# Altium schematic symbol library Connector.SchLib: 231 symbols (part 1 of 2)
Pins are listed as number, name and electrical type; pins without a type are passive.

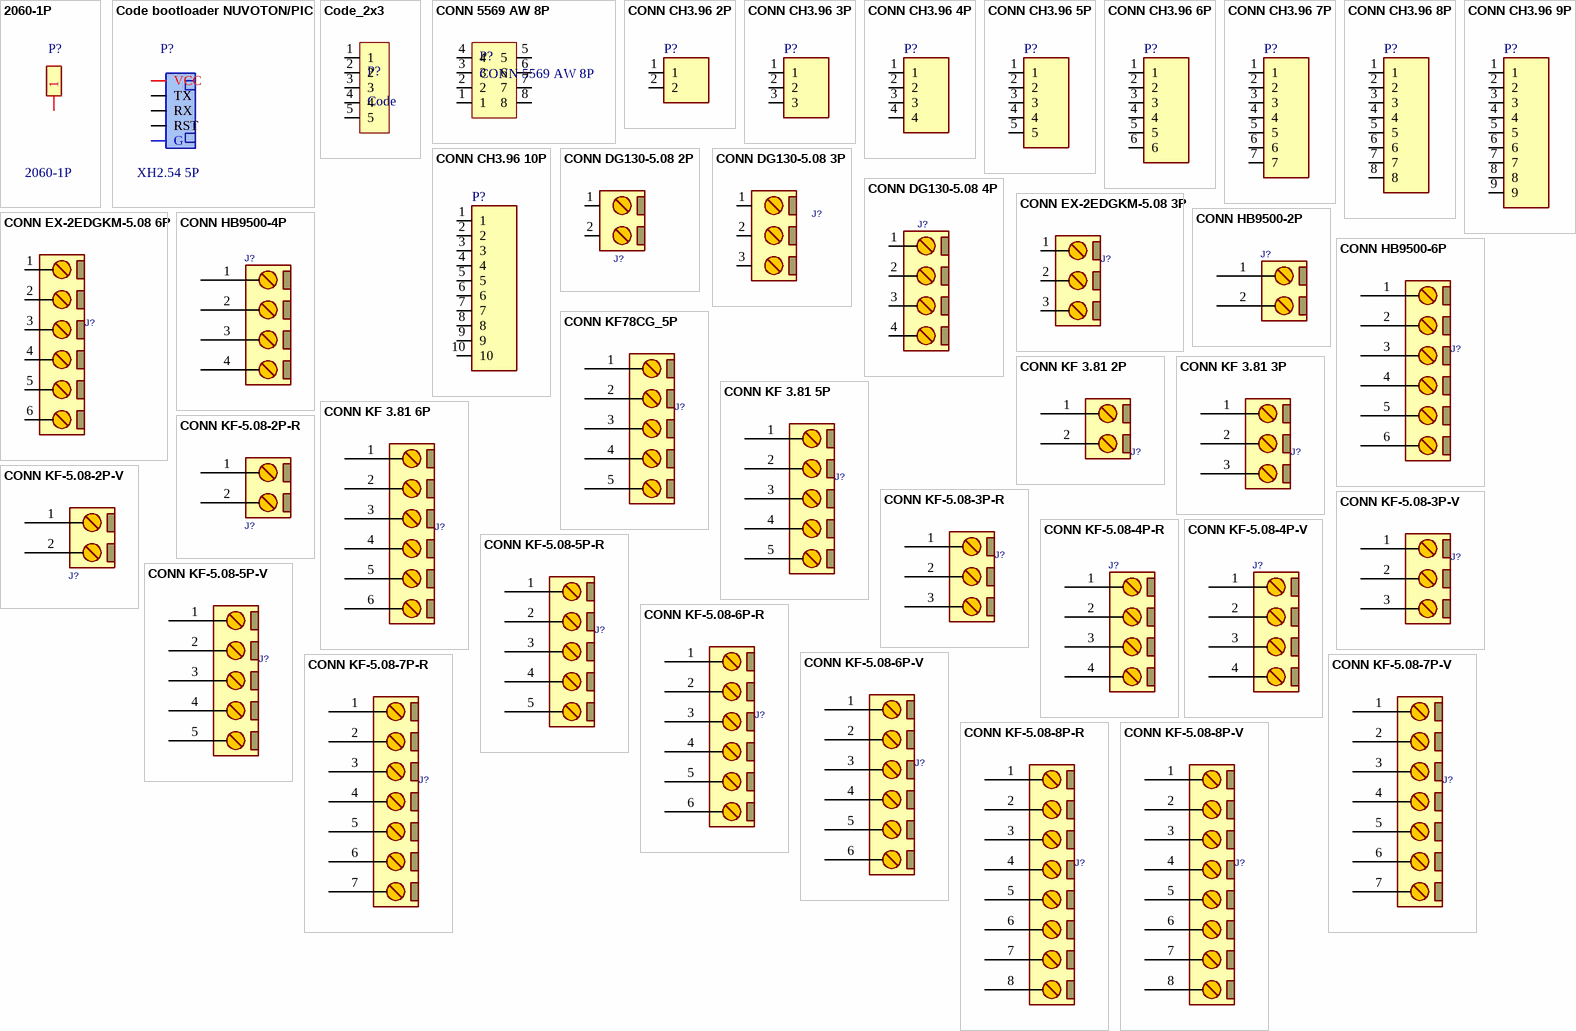
[diagram p0: symbols 2060-1P to CONN KF-5.08-8P-V]

## 2060-1P
designator P?
Code: N/A
footprint 2060 (2060 conector LED)
pins: 1

## Code bootloader NUVOTON/PIC
designator P?, comment XH2.54 5P
Bootloader NUVOTON/PIC; Code: 3509-004
footprint XH2.54_5P (PW10-xx-M, JST-BxB-XH-A pitch: 2.5mm)
pins: 1 G, 2 RST, 3 RX, 4 TX, 5 VCC

## Code_2x3
designator P?, comment Code
2.54, 5 Pin; Code: 3504-027 * 0.075; Designed by: Nhox
footprint CODE 5 PIN 2 (Connector; Header; 3x2 Position)
pins: 1, 2, 3, 4, 5

## CONN 5569 AW 8P
designator P?
CONN 5569 AW 8P pin to pin 4.2mm x 4.2mm; Code: N/A
footprint 5569 8 PIN 4.2mm
pins: 1, 2, 3, 4, 5, 6, 7, 8

## CONN CH3.96 2P
designator P?, comment CH3.96-2P  (value not drawn)
Power Terminal 2pin,Header, 2-Pin; Designed by: TranLuyen; Code: N/A
footprint PWL_2 (Connector; Header; 2 Position)
pins: 1, 2

## CONN CH3.96 3P
designator P?, comment CH3.96-3P  (value not drawn)
Power Terminal 3pin,Header, 3-Pin; Designed by: TranLuyen; Code: N/A
footprint PWL_3 (Connector; Header; 3 Position)
pins: 1, 2, 3

## CONN CH3.96 4P
designator P?, comment CH3.96-4P  (value not drawn)
Power Terminal 4pin,Header, 4-Pin; Designed by: TranLuyen; Code: N/A
footprint PWL_4 (Connector; Header; 4 Position)
pins: 1, 2, 3, 4

## CONN CH3.96 5P
designator P?, comment CH3.96-5P  (value not drawn)
Power Terminal 5pin,Header, 5-Pin; Designed by: TranLuyen; Code: N/A
footprint PWL_5 (Connector; Header; 5 Position)
pins: 1, 2, 3, 4, 5

## CONN CH3.96 6P
designator P?, comment CH3.96-6P  (value not drawn)
Power Terminal 6pin,Header, 6-Pin; Designed by: TranLuyen; Code: N/A
footprint PWL_6 (Connector; Header; 6 Position)
pins: 1, 2, 3, 4, 5, 6

## CONN CH3.96 7P
designator P?, comment CH3.96-7P  (value not drawn)
Power Terminal 7pin,Header, 7-Pin; Designed by: TranLuyen; Code: N/A
footprint PWL_7 (Connector; Header; 7 Position)
pins: 1, 2, 3, 4, 5, 6, 7

## CONN CH3.96 8P
designator P?, comment CH3.96-8P  (value not drawn)
Power Terminal 8pin,Header, 8-Pin; Designed by: TranLuyen; Code: N/A
footprint PWL_8 (Connector; Header; 8 Position)
pins: 1, 2, 3, 4, 5, 6, 7, 8

## CONN CH3.96 9P
designator P?, comment CH3.96-9P  (value not drawn)
Power Terminal 9pin,Header, 9-Pin; Designed by: TranLuyen; Code: N/A
footprint PWL_9 (Connector; Header; 9 Position)
pins: 1, 2, 3, 4, 5, 6, 7, 8, 9

## CONN CH3.96 10P
designator P?, comment CH3.96-10P  (value not drawn)
Power Terminal 10pin,Header, 10-Pin; Designed by: TranLuyen; Code: N/A
footprint PWL_10 (Connector; Header; 10 Position)
pins: 1, 2, 3, 4, 5, 6, 7, 8, 9, 10

## CONN DG130-5.08 2P
designator J?, comment DG130-5.08 2P  (value not drawn)
Code: N/A
footprint DG130-5.08 2P
pins: 1, 2

## CONN DG130-5.08 3P
designator J?, comment DG130-5.08 3P  (value not drawn)
Code: N/A
footprint DG130-5.08 3P
pins: 1, 2, 3

## CONN DG130-5.08 4P
designator J?, comment DG130-5.08 4P  (value not drawn)
Code: N/A
footprint DG130-5.08 4p
pins: 1, 2, 3, 4

## CONN EX-2EDGKM-5.08 3P
designator J?, comment EX-2EDGKM-5.08 3P  (value not drawn)
5.08mm pitch; Designed by: Nhox; Code: N/A
footprint CONN 2EDG 3P
pins: 1, 2, 3

## CONN EX-2EDGKM-5.08 6P
designator J?, comment EX-2EDGKM-5.08 6P  (value not drawn)
5.08mm pitch; Designed by: Nhox; Code: N/A
footprint CONN 2EDG 6P
pins: 1, 2, 3, 4, 5, 6

## CONN HB9500-2P
designator J?, comment HB9500 2P  (value not drawn)
Code: 3519-001; Designed by: Nhox
footprint HB9500-2
pins: 1, 2

## CONN HB9500-4P
designator J?, comment HB9500 4P  (value not drawn)
Code: 3519-003; Designed by: Nhox
footprint HB9500-4
pins: 1, 2, 3, 4

## CONN HB9500-6P
designator J?, comment HB9500 6P  (value not drawn)
Code: 3519-005; Designed by: Nhox
footprint HB9500-6
pins: 1, 2, 3, 4, 5, 6

## CONN KF78CG_5P
designator J?, comment KF78CG_5P  (value not drawn)
KF78CG 13mm 600V 40A; Code: 3524-014; Designed by: TranLuyen
footprint KF78CG_5P (KF78CG 13mm 600V 40A)
pins: 1, 2, 3, 4, 5

## CONN KF 3.81 2P
designator J?, comment KF3.81-2P  (value not drawn)
KF-3.81-2-R Terminal Block Plug-in 3.81mm 2pin chan cong; Code: N/A
footprint CONN KF-3.81-2-R (FCI Pluggable Terminal Block)
pins: 1, 2

## CONN KF 3.81 3P
designator J?, comment KF3.81-3P  (value not drawn)
KF-3.81-3-R Terminal Block Plug-in 3.81mm 3pin chan cong; Code: N/A
footprint CONN KF-3.81-3-R (FCI Pluggable Terminal Block)
pins: 1, 2, 3

## CONN KF 3.81 5P
designator J?, comment KF3.81-5P  (value not drawn)
KF-3.81-5-R Terminal Block Plug-in 3.81mm 5pin chan cong; Designed by: TranLuyen; Code: N/A
footprint CONN KF-3.81-5-R (PHOENIX MC 1.5/5-GF-3.81)
pins: 1, 2, 3, 4, 5

## CONN KF 3.81 6P
designator J?, comment KF3.81-6P  (value not drawn)
KF-3.81-6-R Terminal Block Plug-in 3.81mm 6PIN chan cong; Designed by: TranLuyen; Code: N/A
footprint CONN KF-3.81-6-R (PHOENIX MC 1.5/6-GF-3.81)
pins: 1, 2, 3, 4, 5, 6

## CONN KF-5.08-2P-R
designator J?, comment KF-5.08 2P  (value not drawn)
CONN, PHOENIX MSTB, 5-G, 5.08mm pitch; Code: 3524-011; Designed by: TranLuyen
footprint CONN KF-5.08-2P-R + 3d (PHOENIX MSTB 2, 5-G, 5.08mm pitch, 2pin)
pins: 1, 2

## CONN KF-5.08-2P-V
designator J?, comment KF-5.08 2P  (value not drawn)
CONN, PHOENIX MSTB, 5-G, 5.08mm pitch; Code: 3524-001; Designed by: TranLuyen
footprint CONN KF-5.08-2P-V (PHOENIX MSTB 2, 5-G, 5.08mm pitch, 2pin)
footprint CONN KF-5.08-2P-V+3D (PHOENIX MSTB 2, 5-G, 5.08mm pitch, 2pin)
pins: 1, 2

## CONN KF-5.08-3P-R
designator J?, comment KF-5.08 3P  (value not drawn)
CONN, PHOENIX MSTB, 5-G, 5.08mm pitch; Code: 3524-012; Designed by: TranLuyen
footprint CONN KF-5.08-3P-R + 3d (PHOENIX MSTB 2, 5-G, 5.08mm pitch, 3pin)
footprint CONN KF-5.08-3P-R (PHOENIX MSTB 2, 5-G, 5.08mm pitch, 3pin)
pins: 1, 2, 3

## CONN KF-5.08-3P-V
designator J?, comment KF-5.08 3P  (value not drawn)
CONN, PHOENIX MSTB, 5-G, 5.08mm pitch; Code: 3524-002; Designed by: TranLuyen
footprint CONN KF-5.08-3P-V (PHOENIX MSTBV 2.5/3-GF-5.08)
footprint CONN KF-5.08-3P-V + 3D (PHOENIX MSTBV 2.5/3-GF-5.08)
pins: 1, 2, 3

## CONN KF-5.08-4P-R
designator J?, comment KF-5.08 4P  (value not drawn)
CONN, PHOENIX MSTB, 5-G, 5.08mm pitch; Code: 3524-013; Designed by: TranLuyen
footprint CONN KF-5.08-4P-R + 3d (PHOENIX MSTB 2, 5-G, 5.08mm pitch)
footprint CONN KF-5.08-4P-R (PHOENIX MSTB 2, 5-G, 5.08mm pitch)
pins: 1, 2, 3, 4

## CONN KF-5.08-4P-V
designator J?, comment KF-5.08 4P  (value not drawn)
CONN, PHOENIX MSTB, 5-G, 5.08mm pitch; Code: 3524-003; Designed by: TranLuyen
footprint CONN KF-5.08-4P-V (PHOENIX MSTBV 2.5/4-GF-5.08)
footprint CONN KF-5.08-4P-V + 3D (PHOENIX MSTBV 2.5/4-GF-5.08)
pins: 1, 2, 3, 4

## CONN KF-5.08-5P-R
designator J?, comment KF-5.08 4P  (value not drawn)
CONN, PHOENIX MSTB, 5-G, 5.08mm pitch; Code: 3524-014; Designed by: TranLuyen
footprint CONN KF-5.08-5P-R + 3d (PHOENIX MSTB 2, 5-G, 5.08mm pitch)
footprint CONN KF-5.08-5P-R (PHOENIX MSTB 2, 5-G, 5.08mm pitch)
pins: 1, 2, 3, 4, 5

## CONN KF-5.08-5P-V
designator J?, comment KF-5.08 4P  (value not drawn)
CONN, PHOENIX MSTB, 5-G, 5.08mm pitch; Code: 3524-004; Designed by: TranLuyen
footprint CONN KF-5.08-5P-V (PHOENIX MSTBV 2.5/5-GF-5.08)
footprint CONN KF-5.08-5P-V + 3D (PHOENIX MSTBV 2.5/5-GF-5.08)
pins: 1, 2, 3, 4, 5

## CONN KF-5.08-6P-R
designator J?, comment KF-5.08 6P  (value not drawn)
CONN, PHOENIX MSTB, 5-G, 5.08mm pitch; Code: 3524-015; Designed by: TranLuyen
footprint CONN KF-5.08-6P-R + 3d (PHOENIX MSTB 2, 5-G, 5.08mm pitch)
footprint CONN KF-5.08-6P-R (PHOENIX MSTB 2, 5-G, 5.08mm pitch)
pins: 1, 2, 3, 4, 5, 6

## CONN KF-5.08-6P-V
designator J?, comment KF-5.08 6P  (value not drawn)
CONN, PHOENIX MSTB, 5-G, 5.08mm pitch; Code: 3524-005; Designed by: TranLuyen
footprint CONN KF-5.08-6P-V (PHOENIX MSTBV 2.5/6-GF-5.08)
footprint CONN KF-5.08-6P-V + 3D (PHOENIX MSTBV 2.5/6-GF-5.08)
pins: 1, 2, 3, 4, 5, 6

## CONN KF-5.08-7P-R
designator J?, comment KF-5.08 7P  (value not drawn)
CONN, PHOENIX MSTB, 5-G, 5.08mm pitch; Code: 3524-016; Designed by: TranLuyen
footprint CONN KF-5.08-7P-R + 3d (PHOENIX MSTB 2, 5-G, 5.08mm pitch)
footprint CONN KF-5.08-7P-R (PHOENIX MSTB 2, 5-G, 5.08mm pitch)
pins: 1, 2, 3, 4, 5, 6, 7

## CONN KF-5.08-7P-V
designator J?, comment KF-5.08 7P  (value not drawn)
CONN, PHOENIX MSTB, 5-G, 5.08mm pitch; Code: 3524-006; Designed by: TranLuyen
footprint CONN KF-5.08-7P-V (PHOENIX MSTBV 2.5/7-GF-5.08)
footprint CONN KF-5.08-7P-V + 3D (PHOENIX MSTBV 2.5/7-GF-5.08)
pins: 1, 2, 3, 4, 5, 6, 7

## CONN KF-5.08-8P-R
designator J?, comment KF-5.08 8P  (value not drawn)
CONN, PHOENIX MSTB, 5-G, 5.08mm pitch; Code: 3524-017; Designed by: TranLuyen
footprint CONN KF-5.08-8P-R + 3d (PHOENIX MSTB 2, 5-G, 5.08mm pitch)
footprint CONN KF-5.08-8P-R (PHOENIX MSTB 2, 5-G, 5.08mm pitch)
pins: 1, 2, 3, 4, 5, 6, 7, 8

## CONN KF-5.08-8P-V
designator J?, comment KF-5.08 8P  (value not drawn)
CONN, PHOENIX MSTB, 5-G, 5.08mm pitch; Code: 3524-007; Designed by: TranLuyen
footprint CONN KF-5.08-8P-V (PHOENIX MSTBV 2.5/8-GF-5.08)
footprint CONN KF-5.08-8P-V + 3D (PHOENIX MSTBV 2.5/8-GF-5.08)
pins: 1, 2, 3, 4, 5, 6, 7, 8

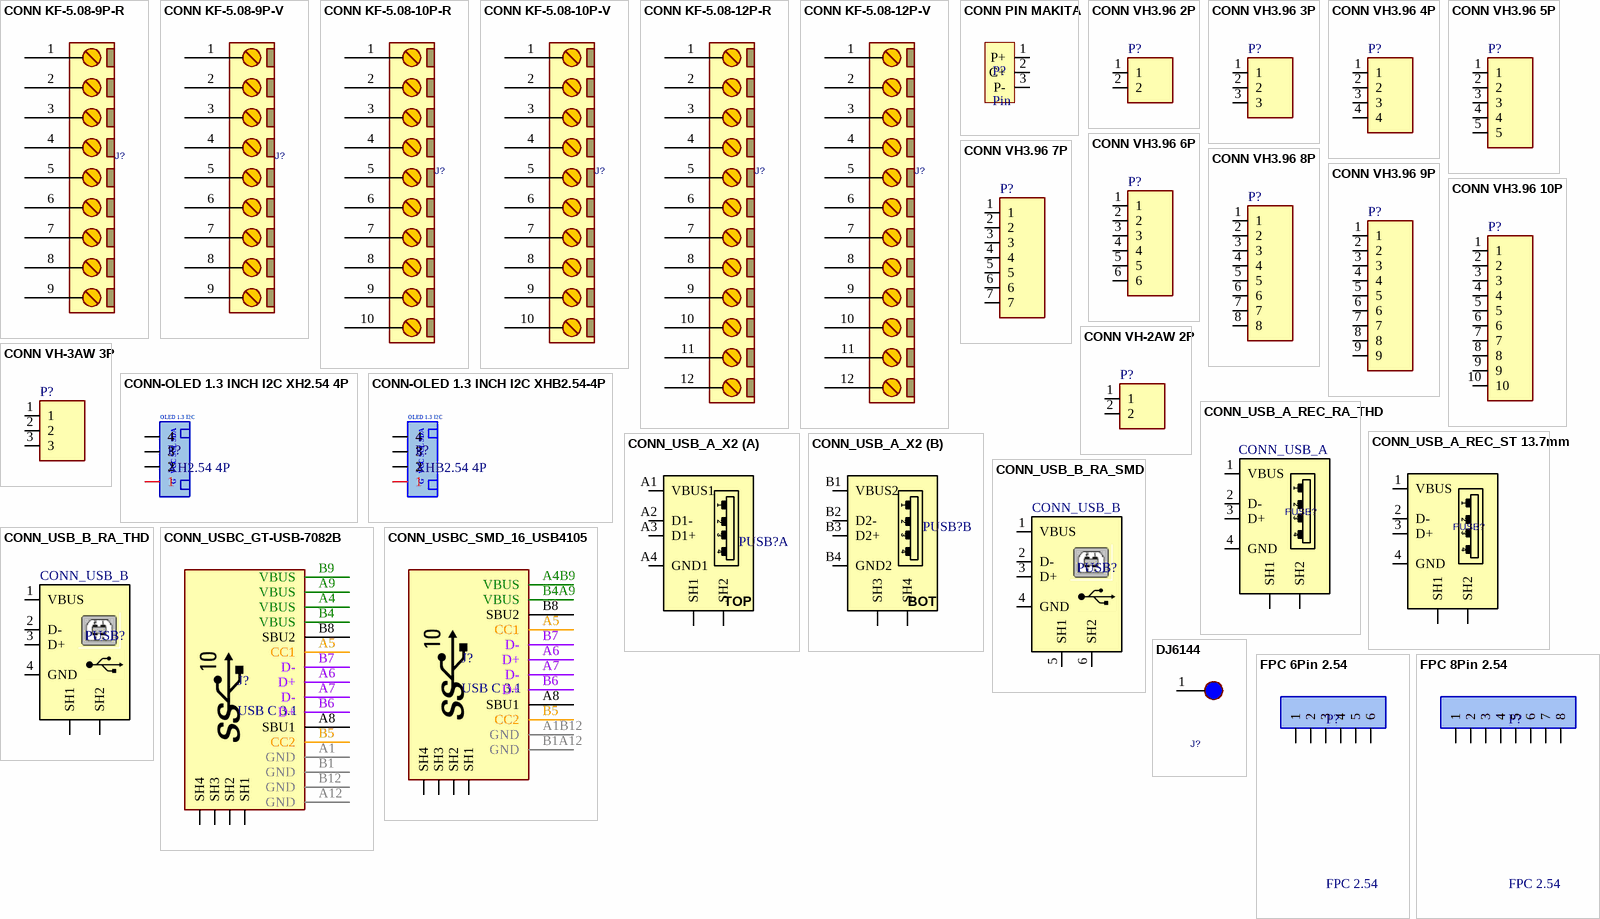
[diagram p1: symbols CONN KF-5.08-9P-R to FPC 8Pin 2.54]

## CONN KF-5.08-9P-R
designator J?, comment KF-5.08 9P  (value not drawn)
CONN, PHOENIX MSTB, 5-G, 5.08mm pitch; Code: 3524-018; Designed by: TranLuyen
footprint CONN KF-5.08-9P-R + 3d (PHOENIX MSTB 2, 5-G, 5.08mm pitch)
pins: 1, 2, 3, 4, 5, 6, 7, 8, 9

## CONN KF-5.08-9P-V
designator J?, comment KF-5.08 9P  (value not drawn)
CONN, PHOENIX MSTB, 5-G, 5.08mm pitch; Code: 3524-008; Designed by: TranLuyen
footprint CONN KF-5.08-9P-V (PHOENIX MSTBV 2.5/9-GF-5.08)
footprint CONN KF-5.08-9P-V + 3D (PHOENIX MSTBV 2.5/9-GF-5.08)
pins: 1, 2, 3, 4, 5, 6, 7, 8, 9

## CONN KF-5.08-10P-R
designator J?, comment UKF5.08 10P  (value not drawn)
CONN, PHOENIX MSTB, 5-G, 5.08mm pitch; Code: 3524-019; Designed by: TranLuyen
footprint CONN KF-5.08-10P-R + 3d (PHOENIX MSTB 2, 5-G, 5.08mm pitch)
footprint CONN KF-5.08-10P-R (PHOENIX MSTB 2, 5-G, 5.08mm pitch)
pins: 1, 2, 3, 4, 5, 6, 7, 8, 9, 10

## CONN KF-5.08-10P-V
designator J?, comment UKF5.08 10P  (value not drawn)
CONN, PHOENIX MSTB, 5-G, 5.08mm pitch; Code: 3524-009; Designed by: TranLuyen
footprint CONN KF-5.08-10P-V (PHOENIX MSTBV 2.5/10-GF-5.08)
footprint CONN KF-5.08-10P-V + 3D (PHOENIX MSTBV 2.5/10-GF-5.08)
pins: 1, 2, 3, 4, 5, 6, 7, 8, 9, 10

## CONN KF-5.08-12P-R
designator J?, comment UKF5.08 12P  (value not drawn)
CONN, PHOENIX MSTB, 5-G, 5.08mm pitch; Code: 3524-020; Designed by: TranLuyen
footprint CONN KF-5.08-12P-R (PHOENIX MSTB 2, 5-G, 5.08mm pitch)
footprint CONN KF-5.08-12P-R + 3D (PHOENIX MSTB 2, 5-G, 5.08mm pitch)
pins: 1, 2, 3, 4, 5, 6, 7, 8, 9, 10, 11, 12

## CONN KF-5.08-12P-V
designator J?, comment UKF5.08 12P  (value not drawn)
CONN, PHOENIX MSTB, 5-G, 5.08mm pitch; Code: 3524-010; Designed by: TranLuyen
footprint CONN KF-5.08-12P-V (PHOENIX MSTBV 2.5/6-GF-5.08)
footprint CONN KF-5.08-12P-V +3D (PHOENIX MSTBV 2.5/6-GF-5.08)
pins: 1, 2, 3, 4, 5, 6, 7, 8, 9, 10, 11, 12

## CONN PIN MAKITA
designator P?, comment Pin
PIN MAKITA; Code: N/A
footprint Pin_Makita (3 Pin)
pins: 1 P+, 2 C+, 3 P-

## CONN VH3.96 2P
designator P?, comment VH3.96-2P  (value not drawn)
Power Terminal 2pin,Header, 2-Pin; Designed by: TranLuyen; Code: N/A
footprint VH_3.96_2 (Connector; Header; 2 Position)
pins: 1, 2

## CONN VH3.96 3P
designator P?, comment VH3.96-3P  (value not drawn)
Power Terminal 3pin,Header, 3-Pin; Code: 3589-039; Designed by: TranLuyen
footprint VH_3.96_3 (Connector; Header; 3 Position)
pins: 1, 2, 3

## CONN VH3.96 4P
designator P?, comment VH3.96-4P  (value not drawn)
Power Terminal 4pin,Header, 4-Pin; Designed by: TranLuyen; Code: N/A
footprint VH_3.96_4 (Connector; Header; 4 Position)
pins: 1, 2, 3, 4

## CONN VH3.96 5P
designator P?, comment VH3.96-5P  (value not drawn)
Power Terminal 5pin,Header, 5-Pin; Designed by: TranLuyen; Code: N/A
footprint VH_3.96_5 (Connector; Header; 5 Position)
pins: 1, 2, 3, 4, 5

## CONN VH3.96 6P
designator P?, comment VH3.96-6P  (value not drawn)
Power Terminal 6pin,Header, 6-Pin; Code: 3589-038; Designed by: TranLuyen
footprint VH_3.96_6 (Connector; Header; 6 Position)
pins: 1, 2, 3, 4, 5, 6

## CONN VH3.96 7P
designator P?, comment VH3.96-7P  (value not drawn)
Power Terminal 7pin,Header, 7-Pin; Designed by: TranLuyen; Code: N/A
footprint VH_3.96_7 (Connector; Header; 7 Position)
pins: 1, 2, 3, 4, 5, 6, 7

## CONN VH3.96 8P
designator P?, comment VH3.96-8P  (value not drawn)
Power Terminal 8pin,Header, 8-Pin; Designed by: TranLuyen; Code: N/A
footprint VH_3.96_8 (Connector; Header; 8 Position)
pins: 1, 2, 3, 4, 5, 6, 7, 8

## CONN VH3.96 9P
designator P?, comment VH3.96-9P  (value not drawn)
Power Terminal 9pin,Header, 9-Pin; Designed by: TranLuyen; Code: N/A
footprint VH_3.96_9 (Connector; Header; 9 Position)
pins: 1, 2, 3, 4, 5, 6, 7, 8, 9

## CONN VH3.96 10P
designator P?, comment VH3.96-10P  (value not drawn)
Power Terminal 10pin,Header, 10-Pin; Designed by: TranLuyen; Code: N/A
footprint VH_3.96_10 (Connector; Header; 10 Position)
pins: 1, 2, 3, 4, 5, 6, 7, 8, 9, 10

## CONN VH-2AW 2P
designator P?, comment VH-2AW  (value not drawn)
Power Terminal 2pin,Header, 2-Pin; Code: 3511-020; Designed by: Nhox
footprint VH-2AW 3.96mm (3.96mm)
pins: 1, 2

## CONN VH-3AW 3P
designator P?, comment VH-3AW  (value not drawn)
Power Terminal 3pin,Header, 3-Pin; Designed by: Nhox; Code: N/A
footprint VH-3AW 3.96mm (3.96mm)
pins: 1, 2, 3

## CONN-OLED 1.3 INCH I2C XH2.54 4P
designator P?, comment XH2.54 4P
XH-T-4 HEADER 4 Pin XH2.54; Code: 3509-003; Code_sub1: 8301-016; Code_sub2: bus 4 2.54 ?cm
footprint XH2.54_4P (PW10-xx-M, JST-BxB-XH-A pitch: 2.5mm)
pins: 1, 2, 3, 4
text: OLED 1.3 I2C; SDA; SCL; VCC; G

## CONN-OLED 1.3 INCH I2C XHB2.54-4P
designator P?, comment XHB2.54 4P
Connector HEADER 4 Pin XHB2.54; Designed by: TranLuyen; Code_sub1: 8301-016; Code_sub2: Bus 4 XHB-2.54 ?cm; Code: N/A
footprint XHB2.54 - 4P
pins: 1, 2, 3, 4
text: OLED 1.3 I2C; SDA; SCL; VCC; G

## CONN_USB_A_REC_RA_THD
designator PUSB?, comment CONN_USB_A
CONN, USB, A, RECEPTACLE, R/A, THD; Code: 3517-047; Designed by: TranLuyen; VALUE: CONN_USB_A
footprint USB_A_REC_RA_THD (CONN, USB A, Receptacle, RIGHT ANGLE, THD)
pins: 1 VBUS, 2 D-, 3 D+, 4 GND, SH1, SH2

## CONN_USB_A_REC_ST 13.7mm
designator PUSB?, comment USB-A-ST  (value not drawn)
CONN USB-A AF 180 13.7mm RECEPTACLE, STRAIGHT, THD; Code: N/A
footprint USB_A_REC_ST
pins: 1 VBUS, 2 D-, 3 D+, 4 GND, SH1, SH2

## CONN_USB_A_X2
designator PUSB?
CONN, USB, A, RECEPTACLE, R/A, THD, DUAL; Code: 3517-064; Designed by: TranLuyen
footprint USB_A_REC_RA_X2 (CONN, USB A, Right Angle, DUAL)
part A pins: A1 VBUS1, A2 D1-, A3 D1+, A4 GND1, SH1, SH2
part B pins: B1 VBUS2, B2 D2-, B3 D2+, B4 GND2, SH3, SH4
part A text: 1; 2; 3; 4; TOP
part B text: 1; 2; 3; 4; BOT

## CONN_USB_B_RA_SMD
designator PUSB?, comment CONN_USB_B
CONN, USB, B, R/A, SMD; Designed by: TranLuyen; Code: N/A; VALUE: CONN_USB_B
footprint USB_B_RA_SMD (CONN, USB B, Receptacle, RIGHT ANGLE, SMD)
footprint USB_B_RA_SMD - CAPBLE (CONN, USB B, Receptacle, RIGHT ANGLE, SMD)
pins: 1 VBUS (power), 2 D-, 3 D+, 4 GND (power), 5 SH1, 6 SH2

## CONN_USB_B_RA_THD
designator PUSB?, comment CONN_USB_B
CONN, USB, B, R/A, THD; Code: 3517-109; Designed by: TranLuyen; VALUE: CONN_USB_B
footprint USB_B_RA_THD (CONN, USB B, Receptacle, RIGHT ANGLE, THD)
pins: 1 VBUS (power), 2 D-, 3 D+, 4 GND (power), SH1, SH2

## CONN_USBC_GT-USB-7082B
designator J?, comment USB C 3.1
CONN, USB, Type C, USB 2.0, Right-Angle, SMD; Rule: UNIONINDEX=0|RULEKIND=Clearance|NETSCOPE=DifferentNets|LAYERKIND=SameLayer|NAME=Schematic Clearance Constraint|GAP=10mil|GENERICCLEARANCE=10mil|IGNOREPADTOPADCLEARANCEINFOOTPRINT=TRUE|OBJECTCLEARANCES=ClearanceObj_Arc-ClearanceObj_Arc:50000;ClearanceObj_Arc-ClearanceObj_Track:50000;ClearanceObj_Arc-ClearanceObj_SMDPad:50000;ClearanceObj_Arc-ClearanceObj_THPad:50000;ClearanceObj_Arc-ClearanceObj_Hole:0;ClearanceObj_Track-ClearanceObj_Track:50000;ClearanceObj_Track-ClearanceObj_SMDPad:50000;ClearanceObj_Track-ClearanceObj_THPad:50000;ClearanceObj_Track-ClearanceObj_Hole:0;ClearanceObj_SMDPad-ClearanceObj_SMDPad:50000;ClearanceObj_SMDPad-ClearanceObj_THPad:50000;ClearanceObj_SMDPad-ClearanceObj_Fill:50000;ClearanceObj_SMDPad-ClearanceObj_Poly:50000;ClearanceObj_SMDPad-ClearanceObj_Region:50000;ClearanceObj_SMDPad-ClearanceObj_Hole:0;ClearanceObj_THPad-ClearanceObj_Hole:0;ClearanceObj_Via-ClearanceObj_Hole:0;ClearanceObj_Fill-ClearanceObj_Hole:0;ClearanceObj_Poly-ClearanceObj_Hole:0;ClearanceObj_Region-ClearanceObj_Hole:0;ClearanceObj_Text-ClearanceObj_Hole:0|UNIT=Imperial; Code: N/A; ComponentLink1Description: Link; ComponentLink1URL: https://jlcpcb.com/partdetail/gswitch-GT_USB7082B/C3001290
footprint USBC_GT-USB-7082B (5A USB 2.0 1 Brick nogging 16P Female -40?~+85? Gold High Conductivity Copper Type-C SMD USB Connectors ROHS)
pins: A1 GND, A4 VBUS, A5 CC1, A6 D+, A7 D-, A8 SBU1, A9 VBUS, A12 GND, B1 GND, B4 VBUS, B5 CC2, B6 D+, B7 D-, B8 SBU2, B9 VBUS, B12 GND, SH1, SH2, SH3, SH4

## CONN_USBC_SMD_16_USB4105
designator J?, comment USB C 3.1
CONN, USB, Type C, USB 2.0, Right-Angle, SMD; Code: 3518-006; Rule: UNIONINDEX=0|RULEKIND=Clearance|NETSCOPE=DifferentNets|LAYERKIND=SameLayer|NAME=Schematic Clearance Constraint|GAP=10mil|GENERICCLEARANCE=10mil|IGNOREPADTOPADCLEARANCEINFOOTPRINT=TRUE|OBJECTCLEARANCES=ClearanceObj_Arc-ClearanceObj_Arc:50000;ClearanceObj_Arc-ClearanceObj_Track:50000;ClearanceObj_Arc-ClearanceObj_SMDPad:50000;ClearanceObj_Arc-ClearanceObj_THPad:50000;ClearanceObj_Arc-ClearanceObj_Hole:0;ClearanceObj_Track-ClearanceObj_Track:50000;ClearanceObj_Track-ClearanceObj_SMDPad:50000;ClearanceObj_Track-ClearanceObj_THPad:50000;ClearanceObj_Track-ClearanceObj_Hole:0;ClearanceObj_SMDPad-ClearanceObj_SMDPad:50000;ClearanceObj_SMDPad-ClearanceObj_THPad:50000;ClearanceObj_SMDPad-ClearanceObj_Fill:50000;ClearanceObj_SMDPad-ClearanceObj_Poly:50000;ClearanceObj_SMDPad-ClearanceObj_Region:50000;ClearanceObj_SMDPad-ClearanceObj_Hole:0;ClearanceObj_THPad-ClearanceObj_Hole:0;ClearanceObj_Via-ClearanceObj_Hole:0;ClearanceObj_Fill-ClearanceObj_Hole:0;ClearanceObj_Poly-ClearanceObj_Hole:0;ClearanceObj_Region-ClearanceObj_Hole:0;ClearanceObj_Text-ClearanceObj_Hole:0|UNIT=Imperial
footprint USBC_SMD_16_USB4105 PAD L (CONN, USB, Type C, USB4105, popular*)
footprint USBC_SMD_16_USB4105 (CONN, USB, Type C, USB4105, popular*)
pins: A1B12 GND, A4B9 VBUS, A5 CC1, A6 D+, A7 D-, A8 SBU1, B1A12 GND, B4A9 VBUS, B5 CC2, B6 D+, B7 D-, B8 SBU2, SH1, SH2, SH3, SH4

## DJ6144
designator J?, comment DJ6144-6.3  (value not drawn)
Code: 3007-048
footprint DJ6144 (DJ6144-6.3)
pins: 1

## FPC 6Pin 2.54
designator P?, comment FPC 2.54
FPC 2.54mm 6 Pin; Code: 3508-016; ComponentLink1 Description: Manufacturer; ComponentLink2 Description: Datasheet; Designed by: TranLuyen; ComponentLink1URL: https://github.com/TranLuyen-dev/Datasheets/blob/7d4b9b9c65f63d567537d9fe137d75c4e4b183e6/Connector/JST-S2B-PH-SM4-TB(LF)(SN)-datasheet.pdf; ComponentLink2URL: http://katalog.we-online.de/em/datasheet/6130xx143121.pdf; ComponentLink1Description: Datasheets; ComponentLink1URL: *
footprint FPC 2.54 6 Pin (FPC connecter 2.54mm 6 Pin)
pins: 1, 2, 3, 4, 5, 6

## FPC 8Pin 2.54
designator P?, comment FPC 2.54
FPC 2.54mm 8 Pin; Code: 3508-016; ComponentLink1 Description: Manufacturer; ComponentLink2 Description: Datasheet; Designed by: TranLuyen; ComponentLink1URL: https://github.com/TranLuyen-dev/Datasheets/blob/7d4b9b9c65f63d567537d9fe137d75c4e4b183e6/Connector/JST-S2B-PH-SM4-TB(LF)(SN)-datasheet.pdf; ComponentLink2URL: http://katalog.we-online.de/em/datasheet/6130xx143121.pdf; ComponentLink1Description: Datasheets; ComponentLink1URL: *
footprint FPC 2.54 8 Pin (FPC connecter 2.54mm 8 Pin)
pins: 1, 2, 3, 4, 5, 6, 7, 8

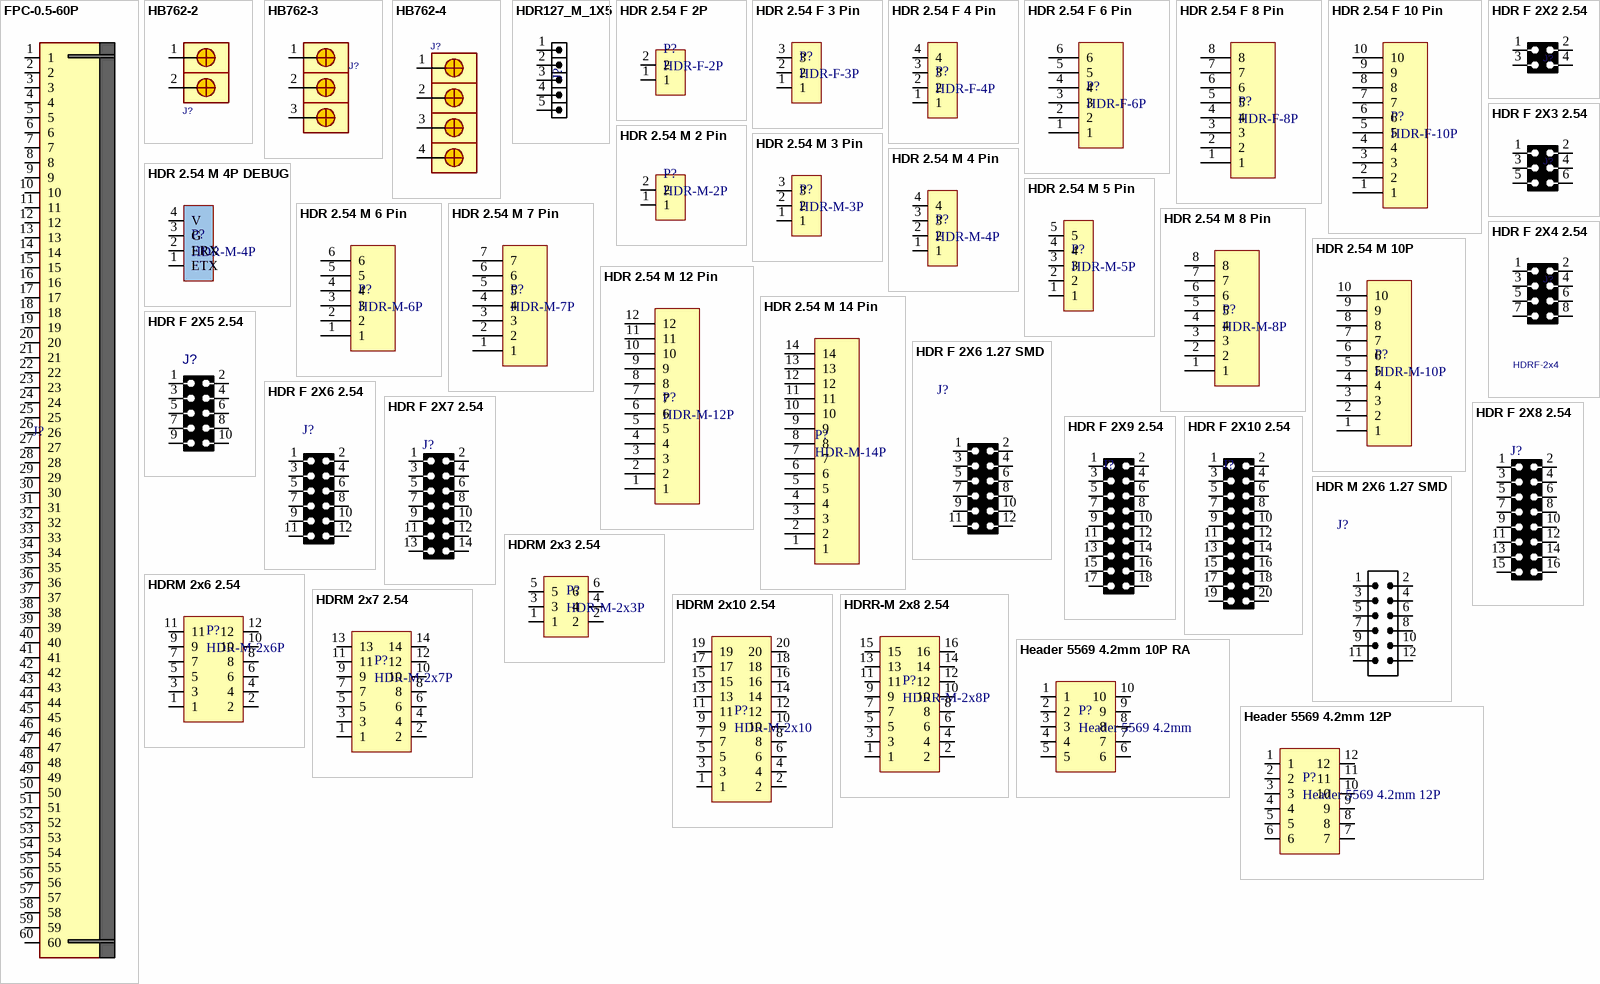
[diagram p2: symbols FPC-0.5-60P to Header 5569 4.2mm 12P]

## FPC-0.5-60P
designator J?  (value not drawn)
CONN, FPC, 0.50mm pitch, RightAngle, Bot. Contact; Code: N/A
footprint FFC_0.5_60P
pins: 1, 2, 3, 4, 5, 6, 7, 8, 9, 10, 11, 12, 13, 14, 15, 16, 17, 18, 19, 20, 21, 22, 23, 24, 25, 26, 27, 28, 29, 30, 31, 32, 33, 34, 35, 36, 37, 38, 39, 40, 41, 42, 43, 44, 45, 46, 47, 48, 49, 50, 51, 52, 53, 54, 55, 56, 57, 58, 59, 60

## HB762-2
designator J?  (value not drawn)
CONN HB762  7.62 mm pitch; Designed by: TranLuyen; Code: N/A
footprint HB762-2
pins: 1, 2

## HB762-3
designator J?  (value not drawn)
CONN HB762  7.62 mm pitch; Designed by: TranLuyen; Code: N/A
footprint HB762-3
pins: 1, 2, 3

## HB762-4
designator J?, comment HB762-4P  (value not drawn)
CONN HB762  7.62 mm pitch; Designed by: TranLuyen; Code: N/A
footprint HB762-4
pins: 1, 2, 3, 4

## HDR127_M_1X5
designator J?, comment HDR1X5  (value not drawn)
CONN, HEADER, Male, pitch: 1.27mm, 5POS; Code: 3502-005 * 0.125pcs
footprint HDR127_M_1X5 (mini header (50mil pitch))
pins: 1, 2, 3, 4, 5

## HDR 2.54 F 2P
designator P?, comment HDR-F-2P
HDR 2.54 FEMALE; Code: N/A
footprint HDR_M_1X2 (Connector; Header; 2 Position)
pins: 1, 2

## HDR 2.54 F 3 Pin
designator P?, comment HDR-F-3P
HDR 2.54 FEMALE; Code: N/A
footprint HDR_M_1X3 (Connector; Header; 3 Position)
pins: 1, 2, 3

## HDR 2.54 F 4 Pin
designator P?, comment HDR-F-4P
HDR 2.54 FEMALE; Code: 3504-029 * 0.1
footprint HDR_F_1X4 (HEADER FEMALE pitch: 2.54mm)
pins: 1, 2, 3, 4

## HDR 2.54 F 6 Pin
designator P?, comment HDR-F-6P
HDR 2.54 FEMALE; Code: 3504-004
footprint HDR_F_1X6 (HEADER FEMALE pitch: 2.54mm)
pins: 1, 2, 3, 4, 5, 6

## HDR 2.54 F 8 Pin
designator P?, comment HDR-F-8P
HDR 2.54 FEMALE; Code: 3504-005
footprint HDR_F_1X8 (HEADER FEMALE pitch: 2.54mm)
pins: 1, 2, 3, 4, 5, 6, 7, 8

## HDR 2.54 F 10 Pin
designator P?, comment HDR-F-10P
HDR 2.54 FEMALE; Code: 3504-006
footprint HDR_F_1X10 (HEADER FEMALE pitch: 2.54mm)
pins: 1, 2, 3, 4, 5, 6, 7, 8, 9, 10

## HDR 2.54 M 2 Pin
designator P?, comment HDR-M-2P
HDR 2.54 MALE; Code: N/A
footprint HDR_M_1X2 (Connector; Header; 2 Position)
pins: 1, 2

## HDR 2.54 M 3 Pin
designator P?, comment HDR-M-3P
HDR 2.54 MALE; Code: N/A
footprint HDR_M_1X3 (Connector; Header; 3 Position)
pins: 1, 2, 3

## HDR 2.54 M 4 Pin
designator P?, comment HDR-M-4P
HDR 2.54 MALE; Code: 3504-028 * 0.1
footprint HDR_M_1X4 (Connector; Header; 2 Position)
pins: 1, 2, 3, 4

## HDR 2.54 M 4P DEBUG
designator P?, comment HDR-M-4P
HDR 2.54 MALE; Code: 3504-028 * 0.1pcs
footprint HDR_M_1X4 (Connector; Header; 2 Position)
pins: 1 ETX, 2 ERX, 3 G, 4 V

## HDR 2.54 M 5 Pin
designator P?, comment HDR-M-5P
HDR 2.54 MALE; Code: 3504-028 * 0.125
footprint HDR_M_1X5 (Connector; Header; 2 Position)
pins: 1, 2, 3, 4, 5

## HDR 2.54 M 6 Pin
designator P?, comment HDR-M-6P
HDR 2.54 MALE; Code: 3504-028 * 0.15
footprint HDR_M_1X6 (Connector; Header; 6 Position)
pins: 1, 2, 3, 4, 5, 6

## HDR 2.54 M 7 Pin
designator P?, comment HDR-M-7P
HDR 2.54 MALE; Code: 3504-028 * 0.175
footprint HDR_M_1X7 (Connector; Header; 7 Position)
pins: 1, 2, 3, 4, 5, 6, 7

## HDR 2.54 M 8 Pin
designator P?, comment HDR-M-8P
HDR 2.54 MALE; Code: 3504-028 * 0.2
footprint HDR_M_1X8 (Connector; Header; 8 Position)
pins: 1, 2, 3, 4, 5, 6, 7, 8

## HDR 2.54 M 10P
designator P?, comment HDR-M-10P
HDR 2.54 MALE; Code: 3504-028 * 0.25pcs
footprint HDR_M_1X10 (Connector; Header; 10 Position)
pins: 1, 2, 3, 4, 5, 6, 7, 8, 9, 10

## HDR 2.54 M 12 Pin
designator P?, comment HDR-M-12P
HDR 2.54 MALE; Code: N/A
footprint HDR_M_1X12 (Connector; Header; 14 Position)
pins: 1, 2, 3, 4, 5, 6, 7, 8, 9, 10, 11, 12

## HDR 2.54 M 14 Pin
designator P?, comment HDR-M-14P
HDR 2.54 MALE; Code: 3504-028 *0.35pcs
footprint HDR_M_1X14 (Connector; Header; 14 Position)
pins: 1, 2, 3, 4, 5, 6, 7, 8, 9, 10, 11, 12, 13, 14

## HDR F 2X2 2.54
designator J?, comment HDRF-2x2  (value not drawn)
CONN, HEADER, Female, pitch: 2.54mm; Code: N/A
footprint HDR_F_2X2 (Connector; Header; 2x2 Position)
pins: 1, 2, 3, 4

## HDR F 2X3 2.54
designator J?, comment HDRF-2X3  (value not drawn)
CONN, HEADER, Female, pitch: 2.54mm; Code: N/A
footprint HDR_F_2X3 (Connector; Header; 3x2 Position)
pins: 1, 2, 3, 4, 5, 6

## HDR F 2X4 2.54
designator J?, comment HDRF-2x4
CONN, HEADER, Female, pitch: 2.54mm; Code: N/A
footprint HDR_F_2X4 (Connector; Header; 4x2 Position)
pins: 1, 2, 3, 4, 5, 6, 7, 8

## HDR F 2X5 2.54
designator J?, comment HDRF-2X5  (value not drawn)
CONN, HEADER, Female, pitch: 2.54mm; Code: N/A
footprint HDR_F_2X5 (Connector; Header; 5x2 Position)
pins: 1, 2, 3, 4, 5, 6, 7, 8, 9, 10

## HDR F 2X6 1.27 SMD
designator J?, comment HDRF-2X6  (value not drawn)
CONN, HEADER, Female, pitch: 1.27mm, SMD; Designed by: Nhox; Code: N/A
footprint HDR_F_2x6 1.27
pins: 1, 2, 3, 4, 5, 6, 7, 8, 9, 10, 11, 12

## HDR F 2X6 2.54
designator J?, comment HDRF-2X6  (value not drawn)
CONN, HEADER, Female, pitch: 2.54mm; Code: N/A
footprint HDR_F_2X6 (Connector; Header; 6x2 Position)
pins: 1, 2, 3, 4, 5, 6, 7, 8, 9, 10, 11, 12

## HDR F 2X7 2.54
designator J?, comment HDRF-2X7  (value not drawn)
CONN, HEADER, Female, pitch: 2.54mm; Code: N/A
footprint HDR_F_2X7 (Connector; Header; 7x2 Position)
pins: 1, 2, 3, 4, 5, 6, 7, 8, 9, 10, 11, 12, 13, 14

## HDR F 2X8 2.54
designator J?, comment HDRF-2X8  (value not drawn)
CONN, HEADER, Female, pitch: 2.54mm; Code: N/A
footprint HDR_F_2X8 (Connector; Header; 8x2 Position)
pins: 1, 2, 3, 4, 5, 6, 7, 8, 9, 10, 11, 12, 13, 14, 15, 16

## HDR F 2X9 2.54
designator J?, comment HDRF-2X9  (value not drawn)
CONN, HEADER, Female, pitch: 2.54mm; Code: N/A
footprint HDR_F_2X9 (Connector; Header; 9x2 Position)
pins: 1, 2, 3, 4, 5, 6, 7, 8, 9, 10, 11, 12, 13, 14, 15, 16, 17, 18

## HDR F 2X10 2.54
designator J?, comment HDRF-2X10  (value not drawn)
CONN, HEADER, Female, pitch: 2.54mm; Code: 3504-049
footprint HDR_F_2X10 (Connector; Header; 10x2 Position)
pins: 1, 2, 3, 4, 5, 6, 7, 8, 9, 10, 11, 12, 13, 14, 15, 16, 17, 18, 19, 20

## HDR M 2X6 1.27 SMD
designator J?, comment HDRF-2X6  (value not drawn)
CONN, HEADER, Male, pitch: 1.27mm, SMD; Designed by: Nhox; Code: N/A
footprint HDR_M_2x6 1.27
pins: 1, 2, 3, 4, 5, 6, 7, 8, 9, 10, 11, 12

## HDRM 2x3 2.54
designator P?, comment HDR-M-2x3P
HDR 2.54 MALE; Code: 3504-027 * 0.15pcs
footprint HDR_M_2X3 (Connector; Header; 3x2 Position)
pins: 1, 2, 3, 4, 5, 6

## HDRM 2x6 2.54
designator P?, comment HDR-M-2x6P
HDR 2.54 MALE; Code: 3504-027 * 0.3pcs
footprint HDR_M_2X6 (Male Header 2X06 with 2.54 mm Pitch)
pins: 1, 2, 3, 4, 5, 6, 7, 8, 9, 10, 11, 12

## HDRM 2x7 2.54
designator P?, comment HDR-M-2x7P
HDR 2.54 MALE; Code: 3504-027 * 0.35pcs
footprint HDR_M_2X7 (Male Header 2X07 with 2.54 mm Pitch)
pins: 1, 2, 3, 4, 5, 6, 7, 8, 9, 10, 11, 12, 13, 14

## HDRM 2x10 2.54
designator P?, comment HDR-M-2x10
HDR 2.54 MALE; Code: 3504-027 * 0.25pcs
footprint HDR_M_2X10 (Male Header 2X10 with 2.54 mm Pitch)
pins: 1, 2, 3, 4, 5, 6, 7, 8, 9, 10, 11, 12, 13, 14, 15, 16, 17, 18, 19, 20

## HDRR-M 2x8 2.54
designator P?, comment HDRR-M-2x8P
HDR 2.54 MALE; Code: 3504-061
footprint HDRR_M_2X8 (Connector; Header; 8x2 Position)
pins: 1, 2, 3, 4, 5, 6, 7, 8, 9, 10, 11, 12, 13, 14, 15, 16

## Header 5569 4.2mm 10P RA
designator P?, comment Header 5569 4.2mm
Code: N/A
footprint 5569 10 PIN 4.2mm (5569 8 PIN 4.2mm)
pins: 1, 2, 3, 4, 5, 6, 7, 8, 9, 10

## Header 5569 4.2mm 12P
designator P?
Code: N/A
footprint 5569 12 PIN 4.2MM
pins: 1, 2, 3, 4, 5, 6, 7, 8, 9, 10, 11, 12

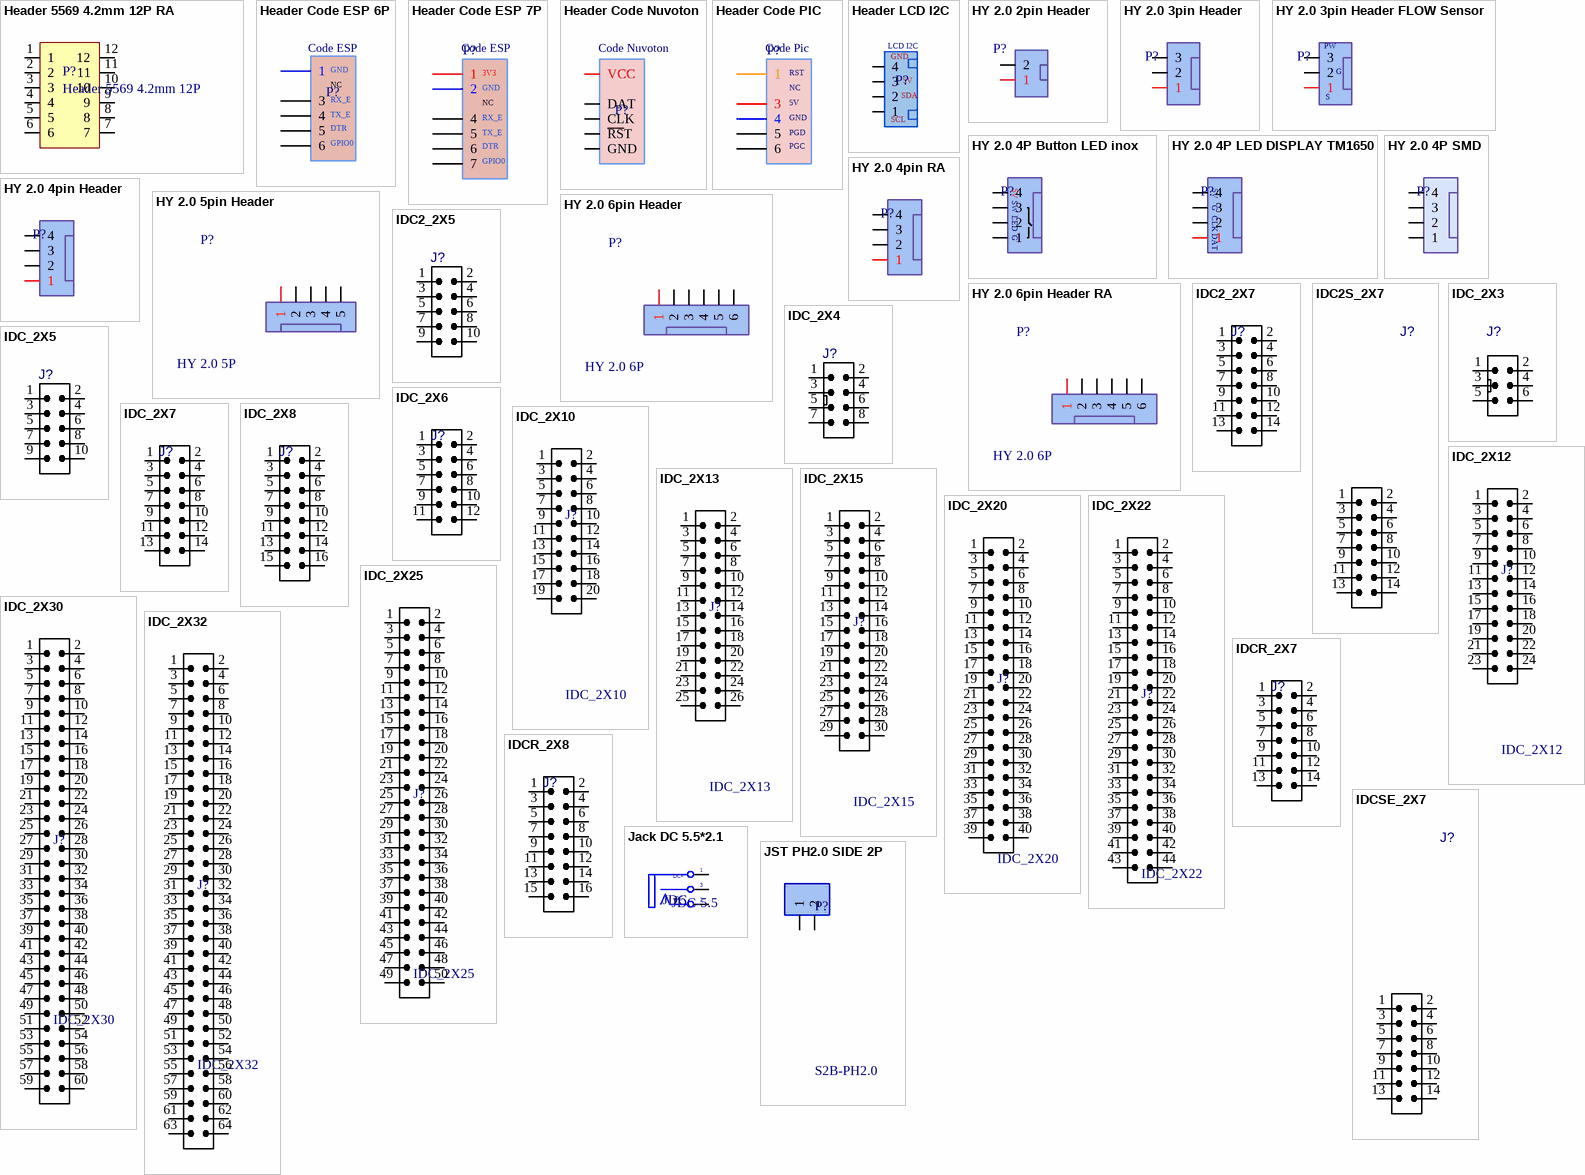
[diagram p3: symbols Header 5569 4.2mm 12P RA to JST PH2.0 SIDE 2P]

## Header 5569 4.2mm 12P RA
designator P?, comment Header 5569 4.2mm 12P
Code: N/A
footprint 5569 12 PIN 4.2MM RA
pins: 1, 2, 3, 4, 5, 6, 7, 8, 9, 10, 11, 12

## Header Code ESP 6P
designator P?, comment HDR 7 Male  (value not drawn)  (no BOM)
Header 7-6Pin; Code: NULL
footprint Header Code ESP 2.54 6P
footprint Header code ESP 2.0 6P
footprint CODE 5 PIN (Connector; Header; 3x2 Position)
pins: 1, 3, 4, 5, 6
text: Code ESP; GND; NC; RX_E; TX_E; DTR; GPIO0

## Header Code ESP 7P
designator P?, comment HDR 7 Male  (value not drawn)  (no BOM)
Header 7-6Pin; Code: NULL
footprint Header Code ESP 2.54 7P
footprint Header code ESP 2.0 7P
pins: 1, 2, 4, 5, 6, 7
text: Code ESP; 3V3; GND; NC; RX_E; TX_E; DTR; GPIO0

## Header Code Nuvoton
designator P?, comment Nuvoton  (value not drawn)  (no BOM)
Header 6-5Pin
footprint Header Code Nuvoton 2.54 6P
footprint CODE 5 PIN (Connector; Header; 3x2 Position)
pins: 1 VCC, 3 DAT, 4 CLK, 5 ~{RS}T, 6 GND
text: Code Nuvoton

## Header Code PIC
designator P?, comment HDR 6 Male  (value not drawn)  (no BOM)
Header 6-5Pin; Code: NULL
footprint Header Code Pic 2.54 6P
footprint Header code PIC 2.0 6P
footprint Header code PIC 1.27 6P (Connector; Header; 6 Position)
pins: 1, 3, 4, 5, 6
text: Code Pic; RST; NC; 5V; GND; PGD; PGC

## Header LCD I2C
designator P?, comment XH2.54 4P  (value not drawn)
XH-T-4 HEADER 4 Pin XH2.54; Code: 3509-003
footprint XH2.54_4P (PW10-xx-M, JST-BxB-XH-A pitch: 2.5mm)
pins: 1, 2, 3, 4
text: LCD I2C; GND; 5V; SDA; SCL

## HY 2.0 2pin Header
designator P?, comment HY2.0 2P  (value not drawn)
Header HY 2.0 2P; Code: 3508-040; Designed by: TranLuyen
footprint HY2.0 2P Header
pins: 1, 2

## HY 2.0 3pin Header
designator P?, comment HY2.0 3P  (value not drawn)
Header HY 2.0 3P; Code: 3508-040-2
footprint HY2.0 3P Header
pins: 1, 2, 3

## HY 2.0 3pin Header FLOW Sensor
designator P?, comment HY2.0 3P  (value not drawn)
Header HY 2.0 3P; Code: 3508-040-2
footprint HY2.0 3P Header
pins: 1, 2, 3
text: PW; G; S

## HY 2.0 4P Button LED inox
designator P?, comment HY 2.0 4P  (value not drawn)
Header HY 2.0 4P; Code: 3508-040-3
footprint HY2.0 4P Header
pins: 1, 2, 3, 4
text: 5V; SW; LED; G

## HY 2.0 4P LED DISPLAY TM1650
designator P?, comment HY 2.0 4P  (value not drawn)
Header HY 2.0 4P; Code: 3508-040-3
footprint HY2.0 4P Header
pins: 1, 2, 3, 4
text: 5V; G; CLK; DAT

## HY 2.0 4P SMD
designator P?, comment HY 2.0 4P  (value not drawn)
Header HY 2.0 4P SMD; Code: N/A
footprint HY2.0 4P SMD
pins: 1, 2, 3, 4

## HY 2.0 4pin Header
designator P?, comment HY 2.0 4P  (value not drawn)
Header HY 2.0 4P; Code: 3508-040-3
footprint HY2.0 4P Header
pins: 1, 2, 3, 4

## HY 2.0 4pin RA
designator P?, comment HY 2.0 4P  (value not drawn)
Header HY 2.0 AW
footprint HY2.0 4P-RA
pins: 1, 2, 3, 4

## HY 2.0 5pin Header
designator P?, comment HY 2.0 5P
Header HY 2.0 5P; Code: 3508-040-4
footprint HY2.0 5P Header
pins: 1, 2, 3, 4, 5

## HY 2.0 6pin Header
designator P?, comment HY 2.0 6P
Header HY 2.0 6P; Code: 3508-040-5
footprint HY2.0 6P Header
pins: 1, 2, 3, 4, 5, 6

## HY 2.0 6pin Header RA
designator P?, comment HY 2.0 6P
Header HY 2.0 6P; Code: N/A
footprint HY2.0 6P Header_ra
pins: 1, 2, 3, 4, 5, 6

## IDC2_2X5
designator J?  (value not drawn)
CONN, IDC, Male, pitch: 2.54mm, 10POS; VALUE: IDC2_2X5
footprint IDC2_2X5 (Connector; Header; 2mm Pitch)
pins: 1, 2, 3, 4, 5, 6, 7, 8, 9, 10

## IDC2_2X7
designator J?  (value not drawn)
CONN, IDC, Male, pitch: 2.54mm, 14POS; VALUE: IDC2_2X7
footprint IDC2_2X7 (Connector; Header; 2mm Pitch)
pins: 1, 2, 3, 4, 5, 6, 7, 8, 9, 10, 11, 12, 13, 14

## IDC2S_2X7
designator J?, comment IDC2_2X7  (value not drawn)
CONN, IDC, Male, pitch: 2.54mm, 14POS, SMD; MANF_P#: 87832-1420; MANF: MOLEX; DESC: CONN HEADER .100 DUAL; ASSEMBLY: ASSEMBLY; PARAM: PARAM; PRICE: PRICE; VALUE: IDC2_2X7
footprint IDC2S_2X7 (MOLEX 87832-1420)
pins: 1, 2, 3, 4, 5, 6, 7, 8, 9, 10, 11, 12, 13, 14

## IDC_2X3
designator J?  (value not drawn)
CONN, IDC, Male, pitch: 2.54mm, 6POS; Code: 3516-028
footprint IDC_2X3
pins: 1, 2, 3, 4, 5, 6

## IDC_2X4
designator J?  (value not drawn)
CONN, IDC, Male, pitch: 2.54mm, 8POS; Code: 3516-029
footprint IDC_2X4 (IDC, HEADER BOX 2X4, 8p, 2.54mm pitch)
pins: 1, 2, 3, 4, 5, 6, 7, 8

## IDC_2X5
designator J?  (value not drawn)
CONN, IDC, Male, pitch: 2.54mm, 10POS; VALUE: IDC_2X5
footprint IDC_2X5 (IDC, HEADER BOX 2X5, 10p, 2.54mm pitch)
pins: 1, 2, 3, 4, 5, 6, 7, 8, 9, 10

## IDC_2X6
designator J?  (value not drawn)
CONN, IDC, Male, pitch: 2.54mm, 12POS; VALUE: IDC_2X6
footprint IDC_2X6
pins: 1, 2, 3, 4, 5, 6, 7, 8, 9, 10, 11, 12

## IDC_2X7
designator J?  (value not drawn)
CONN, IDC, Male, pitch: 2.54mm, 14POS, / DC3 14 PIN; Code: 3516-032; Value: IDC_2X7
footprint IDC_2X7
pins: 1, 2, 3, 4, 5, 6, 7, 8, 9, 10, 11, 12, 13, 14

## IDC_2X8
designator J?  (value not drawn)
CONN, IDC, Male, pitch: 2.54mm, 16POS; Code: 3516-033; Value: IDC_2X8
footprint IDC_2X8
pins: 1, 2, 3, 4, 5, 6, 7, 8, 9, 10, 11, 12, 13, 14, 15, 16

## IDC_2X10
designator J?
CONN, IDC, Male, pitch: 2.54mm, 20POS; VALUE: IDC_2X10
footprint IDC_2X10
pins: 1, 2, 3, 4, 5, 6, 7, 8, 9, 10, 11, 12, 13, 14, 15, 16, 17, 18, 19, 20

## IDC_2X12
designator J?
CONN, IDC, Male, pitch: 2.54mm, 24POS; VALUE: IDC_2X12
footprint IDC_2X12
pins: 1, 2, 3, 4, 5, 6, 7, 8, 9, 10, 11, 12, 13, 14, 15, 16, 17, 18, 19, 20, 21, 22, 23, 24

## IDC_2X13
designator J?
CONN, IDC, Male, pitch: 2.54mm, 26POS; VALUE: IDC_2X13
footprint IDC_2X13
pins: 1, 2, 3, 4, 5, 6, 7, 8, 9, 10, 11, 12, 13, 14, 15, 16, 17, 18, 19, 20, 21, 22, 23, 24, 25, 26

## IDC_2X15
designator J?
CONN, IDC, Male, pitch: 2.54mm, 30POS; VALUE: IDC_2X15
footprint IDC_2X15
pins: 1, 2, 3, 4, 5, 6, 7, 8, 9, 10, 11, 12, 13, 14, 15, 16, 17, 18, 19, 20, 21, 22, 23, 24, 25, 26, 27, 28, 29, 30

## IDC_2X20
designator J?
CONN, IDC, Male, pitch: 2.54mm, 40POS; VALUE: IDC_2X20
footprint IDC_2X20
pins: 1, 2, 3, 4, 5, 6, 7, 8, 9, 10, 11, 12, 13, 14, 15, 16, 17, 18, 19, 20, 21, 22, 23, 24, 25, 26, 27, 28, 29, 30, 31, 32, 33, 34, 35, 36, 37, 38, 39, 40

## IDC_2X22
designator J?
CONN, IDC, Male, pitch: 2.54mm, 44POS; VALUE: IDC_2X22
footprint IDC_2X22
pins: 1, 2, 3, 4, 5, 6, 7, 8, 9, 10, 11, 12, 13, 14, 15, 16, 17, 18, 19, 20, 21, 22, 23, 24, 25, 26, 27, 28, 29, 30, 31, 32, 33, 34, 35, 36, 37, 38, 39, 40, 41, 42, 43, 44

## IDC_2X25
designator J?
CONN, IDC, Male, pitch: 2.54mm, 50POS; VALUE: IDC_2X25
footprint IDC_2X25
pins: 1, 2, 3, 4, 5, 6, 7, 8, 9, 10, 11, 12, 13, 14, 15, 16, 17, 18, 19, 20, 21, 22, 23, 24, 25, 26, 27, 28, 29, 30, 31, 32, 33, 34, 35, 36, 37, 38, 39, 40, 41, 42, 43, 44, 45, 46, 47, 48, 49, 50

## IDC_2X30
designator J?
CONN, IDC, Male, pitch: 2.54mm, 60POS; VALUE: IDC_2X30
footprint IDC_2X30
pins: 1, 2, 3, 4, 5, 6, 7, 8, 9, 10, 11, 12, 13, 14, 15, 16, 17, 18, 19, 20, 21, 22, 23, 24, 25, 26, 27, 28, 29, 30, 31, 32, 33, 34, 35, 36, 37, 38, 39, 40, 41, 42, 43, 44, 45, 46, 47, 48, 49, 50, 51, 52, 53, 54, 55, 56, 57, 58, 59, 60

## IDC_2X32
designator J?
CONN, IDC, Male, pitch: 2.54mm, 64POS; VALUE: IDC_2X32
footprint IDC_2X32
pins: 1, 2, 3, 4, 5, 6, 7, 8, 9, 10, 11, 12, 13, 14, 15, 16, 17, 18, 19, 20, 21, 22, 23, 24, 25, 26, 27, 28, 29, 30, 31, 32, 33, 34, 35, 36, 37, 38, 39, 40, 41, 42, 43, 44, 45, 46, 47, 48, 49, 50, 51, 52, 53, 54, 55, 56, 57, 58, 59, 60, 61, 62, 63, 64

## IDCR_2X7
designator J?, comment IDC_2X7  (value not drawn)
CONN, IDC, Male, pitch: 2.54mm, 14POS, RightAngle; VALUE: IDC_2X7
footprint IDCR_2X7
pins: 1, 2, 3, 4, 5, 6, 7, 8, 9, 10, 11, 12, 13, 14

## IDCR_2X8
designator J?, comment IDC_2X8  (value not drawn)
CONN, IDC, Male, pitch: 2.54mm, 16POS, RightAngle; VALUE: IDC_2X8
footprint IDCR_2X8
pins: 1, 2, 3, 4, 5, 6, 7, 8, 9, 10, 11, 12, 13, 14, 15, 16

## IDCSE_2X7
designator J?, comment IDC_2X7  (value not drawn)
CONN, IDC, Male, pitch: 2.54mm, 14POS, SMD; DESC: CONN HEADER .100 DUAL; MANF_P#: -; MANF: -; ASSEMBLY: ASSEMBLY; PARAM: PARAM; PRICE: PRICE; VALUE: IDC_2X7
footprint IDCSE_2X7 (IDC, HEADER BOX 2X7, 14p, 2.54mm pitch, EDGE of Board)
pins: 1, 2, 3, 4, 5, 6, 7, 8, 9, 10, 11, 12, 13, 14

## Jack DC 5.5*2.1
designator JDC, comment JDC-5.5
Jack DC input. (Remember to add adapter); Code: 3546-007
footprint JACK_DC 5.5 mm
pins: 1 T "Tip", 2 TN "Tip Normal (Break Contact)", 3 S (power) "Sleeve (Ground)"
text: DC+; -DC

## JST PH2.0 SIDE 2P
designator P?, comment S2B-PH2.0
JST PH2.0 max 100V-2A; Code: 3508-012; ComponentLink1 Description: Manufacturer; ComponentLink2 Description: Datasheet; Designed by: TranLuyen; ComponentLink1URL: https://github.com/TranLuyen-dev/Datasheets/blob/7d4b9b9c65f63d567537d9fe137d75c4e4b183e6/Connector/JST-S2B-PH-SM4-TB(LF)(SN)-datasheet.pdf; ComponentLink2URL: http://katalog.we-online.de/em/datasheet/6130xx143121.pdf; ComponentLink1Description: Datasheets; ComponentLink1URL: *
footprint JST-S2B-PH-K-S
pins: 1, 2

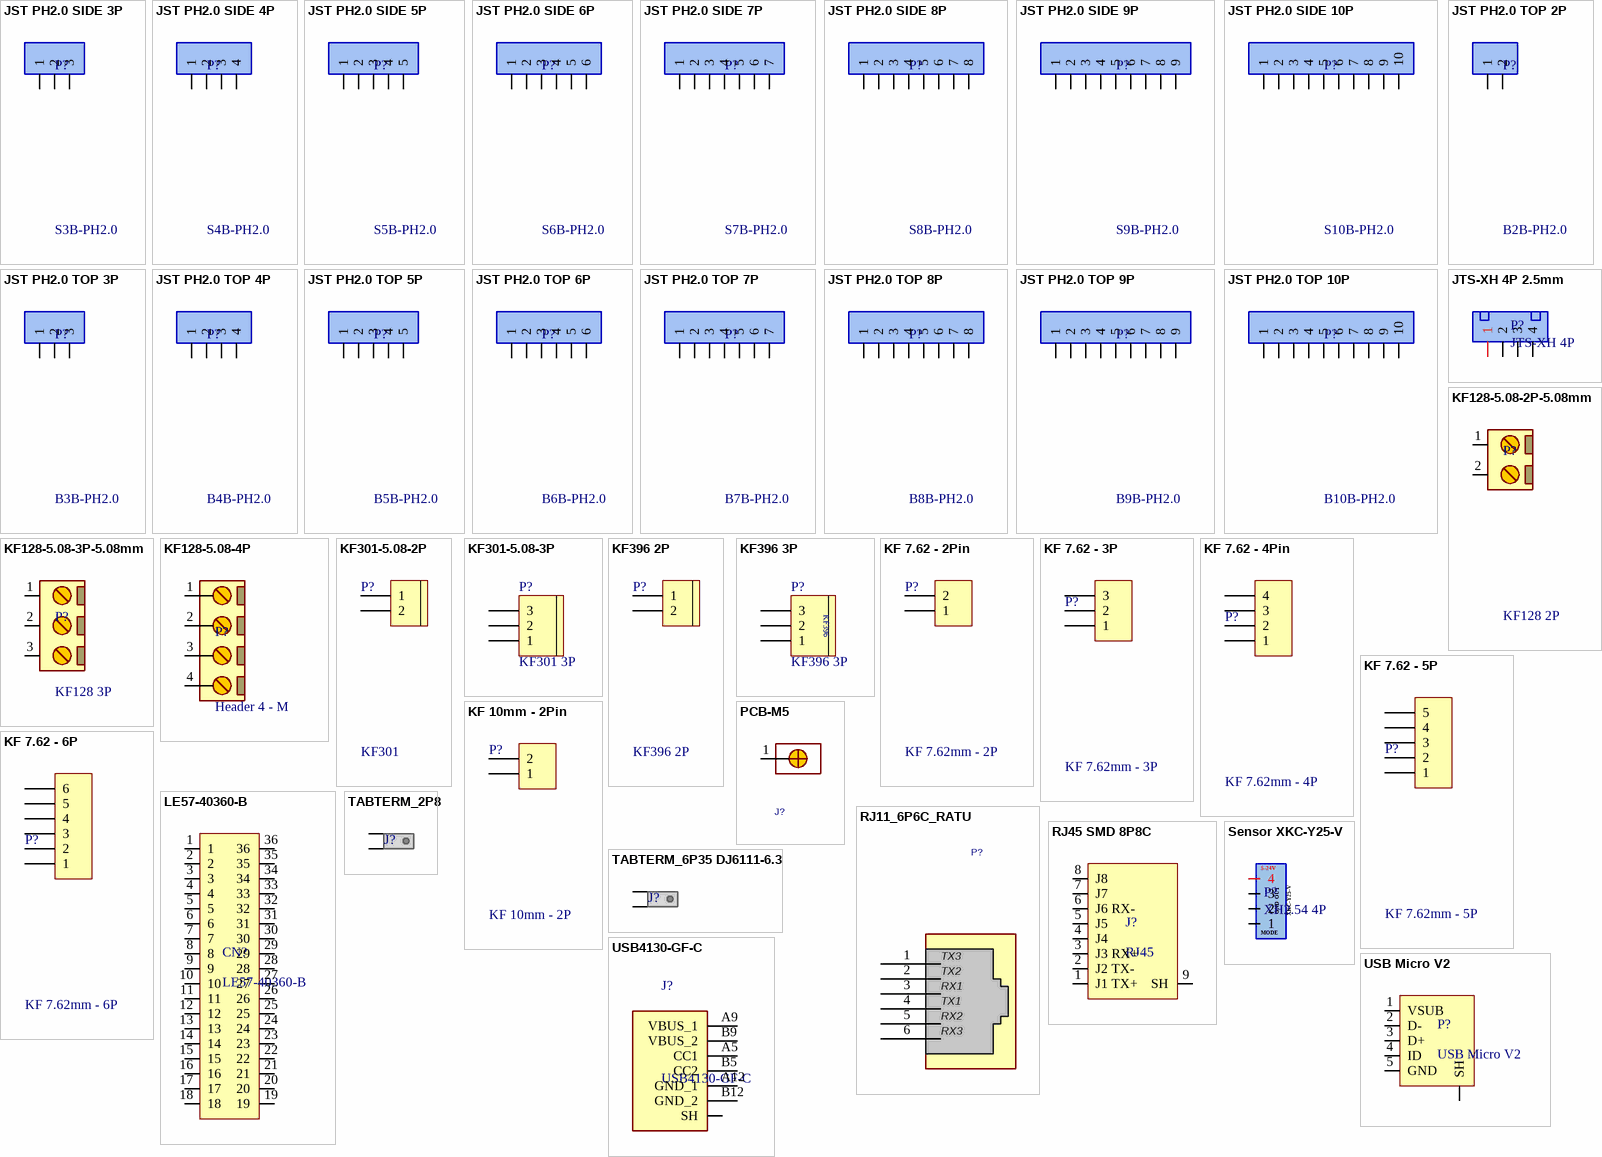
[diagram p4: symbols JST PH2.0 SIDE 3P to USB Micro V2]

## JST PH2.0 SIDE 3P
designator P?, comment S3B-PH2.0
JST PH2.0 max 100V-2A; Code: 3508-013; ComponentLink1 Description: Manufacturer; ComponentLink2 Description: Datasheet; Designed by: TranLuyen; ComponentLink1URL: https://github.com/TranLuyen-dev/Datasheets/blob/7d4b9b9c65f63d567537d9fe137d75c4e4b183e6/Connector/JST-S2B-PH-SM4-TB(LF)(SN)-datasheet.pdf; ComponentLink2URL: http://katalog.we-online.de/em/datasheet/6130xx143121.pdf; ComponentLink1Description: Datasheets; ComponentLink1URL: *
footprint JST-S3B-PH-K-S
pins: 1, 2, 3

## JST PH2.0 SIDE 4P
designator P?, comment S4B-PH2.0
JST PH2.0 max 100V-2A; Code: 3508-014; ComponentLink1 Description: Manufacturer; ComponentLink2 Description: Datasheet; Designed by: TranLuyen; ComponentLink1URL: https://github.com/TranLuyen-dev/Datasheets/blob/7d4b9b9c65f63d567537d9fe137d75c4e4b183e6/Connector/JST-S2B-PH-SM4-TB(LF)(SN)-datasheet.pdf; ComponentLink2URL: http://katalog.we-online.de/em/datasheet/6130xx143121.pdf; ComponentLink1Description: Datasheets; ComponentLink1URL: *
footprint JST-S4B-PH-K-S
pins: 1, 2, 3, 4

## JST PH2.0 SIDE 5P
designator P?, comment S5B-PH2.0
JST PH2.0 max 100V-2A; Code: 3508-015; ComponentLink1 Description: Manufacturer; ComponentLink2 Description: Datasheet; Designed by: TranLuyen; ComponentLink1URL: https://github.com/TranLuyen-dev/Datasheets/blob/7d4b9b9c65f63d567537d9fe137d75c4e4b183e6/Connector/JST-S2B-PH-SM4-TB(LF)(SN)-datasheet.pdf; ComponentLink2URL: http://katalog.we-online.de/em/datasheet/6130xx143121.pdf; ComponentLink1Description: Datasheets; ComponentLink1URL: *
footprint JST-S5B-PH-K-S
pins: 1, 2, 3, 4, 5

## JST PH2.0 SIDE 6P
designator P?, comment S6B-PH2.0
JST PH2.0 max 100V-2A; Code: 3508-016; ComponentLink1 Description: Manufacturer; ComponentLink2 Description: Datasheet; Designed by: TranLuyen; ComponentLink1URL: https://github.com/TranLuyen-dev/Datasheets/blob/7d4b9b9c65f63d567537d9fe137d75c4e4b183e6/Connector/JST-S2B-PH-SM4-TB(LF)(SN)-datasheet.pdf; ComponentLink2URL: http://katalog.we-online.de/em/datasheet/6130xx143121.pdf; ComponentLink1Description: Datasheets; ComponentLink1URL: *
footprint JST-S6B-PH-K-S
pins: 1, 2, 3, 4, 5, 6

## JST PH2.0 SIDE 7P
designator P?, comment S7B-PH2.0
JST PH2.0 max 100V-2A; Code: 3508-017; ComponentLink1 Description: Manufacturer; ComponentLink2 Description: Datasheet; Designed by: TranLuyen; ComponentLink1URL: https://github.com/TranLuyen-dev/Datasheets/blob/7d4b9b9c65f63d567537d9fe137d75c4e4b183e6/Connector/JST-S2B-PH-SM4-TB(LF)(SN)-datasheet.pdf; ComponentLink2URL: http://katalog.we-online.de/em/datasheet/6130xx143121.pdf; ComponentLink1Description: Datasheets; ComponentLink1URL: *
footprint JST-S7B-PH-K-S
pins: 1, 2, 3, 4, 5, 6, 7

## JST PH2.0 SIDE 8P
designator P?, comment S8B-PH2.0
JST PH2.0 max 100V-2A; Code: 3508-018; ComponentLink1 Description: Manufacturer; ComponentLink2 Description: Datasheet; Designed by: TranLuyen; ComponentLink1URL: https://github.com/TranLuyen-dev/Datasheets/blob/7d4b9b9c65f63d567537d9fe137d75c4e4b183e6/Connector/JST-S2B-PH-SM4-TB(LF)(SN)-datasheet.pdf; ComponentLink2URL: http://katalog.we-online.de/em/datasheet/6130xx143121.pdf; ComponentLink1Description: Datasheets; ComponentLink1URL: *
footprint JST-S8B-PH-K-S
pins: 1, 2, 3, 4, 5, 6, 7, 8

## JST PH2.0 SIDE 9P
designator P?, comment S9B-PH2.0
JST PH2.0 max 100V-2A; Code: 3508-019; ComponentLink1 Description: Manufacturer; ComponentLink2 Description: Datasheet; Designed by: TranLuyen; ComponentLink1URL: https://github.com/TranLuyen-dev/Datasheets/blob/7d4b9b9c65f63d567537d9fe137d75c4e4b183e6/Connector/JST-S2B-PH-SM4-TB(LF)(SN)-datasheet.pdf; ComponentLink2URL: http://katalog.we-online.de/em/datasheet/6130xx143121.pdf; ComponentLink1Description: Datasheets; ComponentLink1URL: *
footprint JST-S9B-PH-K-S
pins: 1, 2, 3, 4, 5, 6, 7, 8, 9

## JST PH2.0 SIDE 10P
designator P?, comment S10B-PH2.0
JST PH2.0 max 100V-2A; ComponentLink1 Description: Manufacturer; ComponentLink2 Description: Datasheet; Designed by: TranLuyen; Code: N/A; ComponentLink1URL: https://github.com/TranLuyen-dev/Datasheets/blob/7d4b9b9c65f63d567537d9fe137d75c4e4b183e6/Connector/JST-S2B-PH-SM4-TB(LF)(SN)-datasheet.pdf; ComponentLink2URL: http://katalog.we-online.de/em/datasheet/6130xx143121.pdf; ComponentLink1Description: Datasheets; ComponentLink1URL: *
footprint JST-S10B-PH-K-S
pins: 1, 2, 3, 4, 5, 6, 7, 8, 9, 10

## JST PH2.0 TOP 2P
designator P?, comment B2B-PH2.0
JST PH2.0 max 100V-2A; Code: 3508-001; ComponentLink1 Description: Manufacturer; ComponentLink2 Description: Datasheet; Designed by: TranLuyen; ComponentLink1URL: https://github.com/TranLuyen-dev/Datasheets/blob/7d4b9b9c65f63d567537d9fe137d75c4e4b183e6/Connector/JST-S2B-PH-SM4-TB(LF)(SN)-datasheet.pdf; ComponentLink2URL: http://katalog.we-online.de/em/datasheet/6130xx143121.pdf; ComponentLink1Description: Datasheets; ComponentLink1URL: *
footprint JST-B2B-PH-K-S
pins: 1, 2

## JST PH2.0 TOP 3P
designator P?, comment B3B-PH2.0
JST PH2.0 max 100V-2A; Code: 3508-002; ComponentLink1 Description: Manufacturer; ComponentLink2 Description: Datasheet; Designed by: TranLuyen; ComponentLink1URL: https://github.com/TranLuyen-dev/Datasheets/blob/7d4b9b9c65f63d567537d9fe137d75c4e4b183e6/Connector/JST-S2B-PH-SM4-TB(LF)(SN)-datasheet.pdf; ComponentLink2URL: http://katalog.we-online.de/em/datasheet/6130xx143121.pdf; ComponentLink1Description: Datasheets; ComponentLink1URL: *
footprint JST-B3B-PH-K-S
pins: 1, 2, 3

## JST PH2.0 TOP 4P
designator P?, comment B4B-PH2.0
JST PH2.0 max 100V-2A; Code: 3508-003; ComponentLink1 Description: Manufacturer; ComponentLink2 Description: Datasheet; Designed by: TranLuyen; ComponentLink1URL: https://github.com/TranLuyen-dev/Datasheets/blob/7d4b9b9c65f63d567537d9fe137d75c4e4b183e6/Connector/JST-S2B-PH-SM4-TB(LF)(SN)-datasheet.pdf; ComponentLink2URL: http://katalog.we-online.de/em/datasheet/6130xx143121.pdf; ComponentLink1Description: Datasheets; ComponentLink1URL: *
footprint JST-B4B-PH-K-S
pins: 1, 2, 3, 4

## JST PH2.0 TOP 5P
designator P?, comment B5B-PH2.0
JST PH2.0 max 100V-2A; Code: 3508-004; ComponentLink1 Description: Manufacturer; ComponentLink2 Description: Datasheet; Designed by: TranLuyen; ComponentLink1URL: https://github.com/TranLuyen-dev/Datasheets/blob/7d4b9b9c65f63d567537d9fe137d75c4e4b183e6/Connector/JST-S2B-PH-SM4-TB(LF)(SN)-datasheet.pdf; ComponentLink2URL: http://katalog.we-online.de/em/datasheet/6130xx143121.pdf; ComponentLink1Description: Datasheets; ComponentLink1URL: *
footprint JST-B5B-PH-K-S
pins: 1, 2, 3, 4, 5

## JST PH2.0 TOP 6P
designator P?, comment B6B-PH2.0
JST PH2.0 max 100V-2A; Code: 3508-005; ComponentLink1 Description: Manufacturer; ComponentLink2 Description: Datasheet; Designed by: TranLuyen; ComponentLink1URL: https://github.com/TranLuyen-dev/Datasheets/blob/7d4b9b9c65f63d567537d9fe137d75c4e4b183e6/Connector/JST-S2B-PH-SM4-TB(LF)(SN)-datasheet.pdf; ComponentLink2URL: http://katalog.we-online.de/em/datasheet/6130xx143121.pdf; ComponentLink1Description: Datasheets; ComponentLink1URL: *
footprint JST-B6B-PH-K-S
pins: 1, 2, 3, 4, 5, 6

## JST PH2.0 TOP 7P
designator P?, comment B7B-PH2.0
JST PH2.0 max 100V-2A; Code: 3508-006; ComponentLink1 Description: Manufacturer; ComponentLink2 Description: Datasheet; Designed by: TranLuyen; ComponentLink1URL: https://github.com/TranLuyen-dev/Datasheets/blob/7d4b9b9c65f63d567537d9fe137d75c4e4b183e6/Connector/JST-S2B-PH-SM4-TB(LF)(SN)-datasheet.pdf; ComponentLink2URL: http://katalog.we-online.de/em/datasheet/6130xx143121.pdf; ComponentLink1Description: Datasheets; ComponentLink1URL: *
footprint JST-B7B-PH-K-S
pins: 1, 2, 3, 4, 5, 6, 7

## JST PH2.0 TOP 8P
designator P?, comment B8B-PH2.0
JST PH2.0 max 100V-2A; Code: 3508-007; ComponentLink1 Description: Manufacturer; ComponentLink2 Description: Datasheet; Designed by: TranLuyen; ComponentLink1URL: https://github.com/TranLuyen-dev/Datasheets/blob/7d4b9b9c65f63d567537d9fe137d75c4e4b183e6/Connector/JST-S2B-PH-SM4-TB(LF)(SN)-datasheet.pdf; ComponentLink2URL: http://katalog.we-online.de/em/datasheet/6130xx143121.pdf; ComponentLink1Description: Datasheets; ComponentLink1URL: *
footprint JST-B8B-PH-K-S
pins: 1, 2, 3, 4, 5, 6, 7, 8

## JST PH2.0 TOP 9P
designator P?, comment B9B-PH2.0
JST PH2.0 max 100V-2A; Code: 3508-008; ComponentLink1 Description: Manufacturer; ComponentLink2 Description: Datasheet; Designed by: TranLuyen; ComponentLink1URL: https://github.com/TranLuyen-dev/Datasheets/blob/7d4b9b9c65f63d567537d9fe137d75c4e4b183e6/Connector/JST-S2B-PH-SM4-TB(LF)(SN)-datasheet.pdf; ComponentLink2URL: http://katalog.we-online.de/em/datasheet/6130xx143121.pdf; ComponentLink1Description: Datasheets; ComponentLink1URL: *
footprint JST-B9B-PH-K-S
pins: 1, 2, 3, 4, 5, 6, 7, 8, 9

## JST PH2.0 TOP 10P
designator P?, comment B10B-PH2.0
JST PH2.0 max 100V-2A; Code: 3508-009; ComponentLink1 Description: Manufacturer; ComponentLink2 Description: Datasheet; Designed by: TranLuyen; ComponentLink1URL: https://github.com/TranLuyen-dev/Datasheets/blob/7d4b9b9c65f63d567537d9fe137d75c4e4b183e6/Connector/JST-S2B-PH-SM4-TB(LF)(SN)-datasheet.pdf; ComponentLink2URL: http://katalog.we-online.de/em/datasheet/6130xx143121.pdf; ComponentLink1Description: Datasheets; ComponentLink1URL: *
footprint JST-B10B-PH-K-S
pins: 1, 2, 3, 4, 5, 6, 7, 8, 9, 10

## JTS-XH 4P 2.5mm
designator P?, comment JTS-XH 4P
1x4P 4P XH 1 2.5mm 4 Brass SMD,P=2.54mm Wire To Board Connector ROHS; Code: 3509-089
footprint JTS-XH 4P 2.5mm SMD (1x4P 4P XH 1 2.5mm 4 Brass SMD,P=2.54mm Wire To Board Connector ROHS)
pins: 1, 2, 3, 4

## KF128-5.08-2P-5.08mm
designator P?, comment KF128 2P
Header, 2-Pin, Medium KF128 2P-5.08mm; Code: 3520-013; Designed by: TranLuyen; ComponentLink1 Description: Manufacturer; ComponentLink2 Description: Datasheet; ComponentLink1URL: http://www.we-online.com; ComponentLink2URL: http://katalog.we-online.de/em/datasheet/6911031100xx.pdf
footprint KF128 5.08 2P
pins: 1, 2

## KF128-5.08-3P-5.08mm
designator P?, comment KF128 3P
Header, 3-Pin, Medium KF128 3P-5.08mm; Code: 3520-014; Designed by: TranLuyen
footprint KF128 5.08 3P
pins: 1, 2, 3

## KF128-5.08-4P
designator P?, comment Header 4 - M
Header, 3-Pin, Medium; Code: 3520-032
footprint KF128 5.08 4P
pins: 1, 2, 3, 4

## KF301-5.08-2P
designator P?, comment KF301
Header, 2-Pin, Medium; Code: 3520-001; ComponentLink1 Description: Manufacturer; ComponentLink2 Description: Datasheet; ComponentLink1URL: http://www.we-online.com; ComponentLink2URL: http://katalog.we-online.de/em/datasheet/6911031100xx.pdf
footprint KF301 2P
pins: 1, 2

## KF301-5.08-3P
designator P?, comment KF301 3P
Header, 3-Pin, Medium; Code: 3520-002
footprint KF301 3P
pins: 1, 2, 3

## KF396 2P
designator P?
Header, 2-Pin, KF 3.96; Code: 3520-021; Designed by: TranLuyen; ComponentLink1 Description: Manufacturer; ComponentLink2 Description: Datasheet; ComponentLink1URL: http://www.we-online.com; ComponentLink2URL: http://katalog.we-online.de/em/datasheet/6911031100xx.pdf
footprint KF396 2P
pins: 1, 2

## KF396 3P
designator P?
Header, 3-Pin KF 3.96; Code: 3520-022; Designed by: TranLuyen
footprint KF396 3P
pins: 1, 2, 3
text: KF396

## KF 7.62 - 2Pin
designator P?, comment KF 7.62mm - 2P
Code: 3519-034; ComponentLink1 Description: Manufacturer; ComponentLink2 Description: Datasheet; Designed by: Tran Luyen; ComponentLink1URL: http://www.we-online.com; ComponentLink2URL: http://katalog.we-online.de/em/datasheet/6911031100xx.pdf
footprint KF 7.62 - 2
pins: 1, 2

## KF 7.62 - 3P
designator P?, comment KF 7.62mm - 3P
Code: 3519-035; ComponentLink1 Description: Manufacturer; ComponentLink2 Description: Datasheet; Designed by: Tran Luyen; ComponentLink1URL: http://www.we-online.com; ComponentLink2URL: http://katalog.we-online.de/em/datasheet/6911031100xx.pdf
footprint KF 7.62 - 3
pins: 1, 2, 3

## KF 7.62 - 4Pin
designator P?, comment KF 7.62mm - 4P
Code: 3519-036; ComponentLink1 Description: Manufacturer; ComponentLink2 Description: Datasheet; Designed by: Tran Luyen; ComponentLink1URL: http://www.we-online.com; ComponentLink2URL: http://katalog.we-online.de/em/datasheet/6911031100xx.pdf
footprint KF 7.62 - 4
pins: 1, 2, 3, 4

## KF 7.62 - 5P
designator P?, comment KF 7.62mm - 5P
ComponentLink1 Description: Manufacturer; ComponentLink2 Description: Datasheet; Code: N/A; ComponentLink1URL: http://www.we-online.com; ComponentLink2URL: http://katalog.we-online.de/em/datasheet/6911031100xx.pdf
footprint KF 7.62 - 5
pins: 1, 2, 3, 4, 5

## KF 7.62 - 6P
designator P?, comment KF 7.62mm - 6P
Code: 3519-038; ComponentLink1 Description: Manufacturer; ComponentLink2 Description: Datasheet; Designed by: Tran Luyen; ComponentLink1URL: http://www.we-online.com; ComponentLink2URL: http://katalog.we-online.de/em/datasheet/6911031100xx.pdf
footprint KF 7.62 - 6
pins: 1, 2, 3, 4, 5, 6

## KF 10mm - 2Pin
designator P?, comment KF 10mm - 2P
Code: 3519-034; ComponentLink1 Description: Manufacturer; ComponentLink2 Description: Datasheet; Designed by: Tran Luyen; ComponentLink1URL: http://www.we-online.com; ComponentLink2URL: http://katalog.we-online.de/em/datasheet/6911031100xx.pdf
footprint KF 10MM
pins: 1, 2

## LE57-40360-B
designator CN?
Code: N/A
footprint LE57-40360-B
pins: 1, 2, 3, 4, 5, 6, 7, 8, 9, 10, 11, 12, 13, 14, 15, 16, 17, 18, 19, 20, 21, 22, 23, 24, 25, 26, 27, 28, 29, 30, 31, 32, 33, 34, 35, 36

## PCB-M5
designator J?, comment Terminal PCB-M5  (value not drawn)
Code: N/A
footprint PCB-M5
pins: 1

## RJ11_6P6C_RATU
designator P?, comment 6P6C  (value not drawn)
RJ11, 6P6C, RightAngle, Tab Up; Code: 3528-012; Designed by: TranLuyen
footprint RJ11_6P6C_ST (RJ11, 6P6C, Straight, WURTH 615006144121)
pins: 1 TX3, 2 TX2, 3 RX1, 4 TX1, 5 RX2, 6 RX3

## RJ45 SMD 8P8C
designator J?, comment RJ45
RJ45 SMD 8P8C, 90*; Designed by: Nhox; Code: N/A
footprint RJ45_SMD (8P8C)
pins: 1 J1 TX+, 2 J2 TX-, 3 J3 RX+, 4 J4, 5 J5, 6 J6 RX-, 7 J7, 8 J8, 9 SH

## Sensor XKC-Y25-V
designator P?, comment XH2.54 4P
water lever sensor; Code: 3509-003; Code_sub1: N/A
footprint XH2.54_4P (PW10-xx-M, JST-BxB-XH-A pitch: 2.5mm)
pins: 1, 2, 3, 4
text: 5-24V; OUT; GND; XKC-Y25-V; MODE